# EAGLE library part BN61-2402_BRIDGE (library HansToroid)
BN43-202 SWR bridge
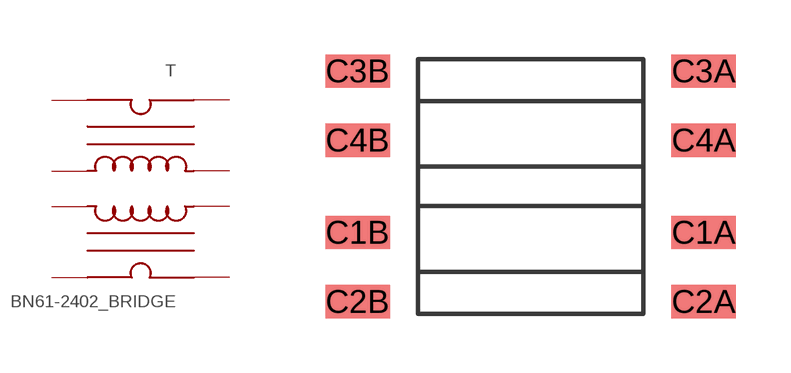
[diagram p6: symbol with the pads of BN61-2402_BRIDGE_SMD; footprint BN61-2402_BRIDGE_SMD]

Designator prefix T

## BN61-2402_BRIDGE2402  [BN61-2402_BRIDGE_SMD]
C1A  C1A
C1B  C1B
C2A  C2A
C2B  C2B
C3A  C3A
C3B  C3B
C4A  C4A
C4B  C4B

## Footprint BN61-2402_BRIDGE_SMD (pad centres in mm)
Transformer on T50 Core, having two windings.
smd 1.778 x 0.914: C1A 4.763,-1.27; C1B -4.763,-1.27; C2A 4.763,-3.175; C2B -4.763,-3.175; C3A 4.763,3.175; C3B -4.763,3.175; C4A 4.763,1.27; C4B -4.763,1.27